# Altium integrated library 62684-5511N0AHLF.IntLib: 1 symbol
Pins are listed as number, name and electrical type; pins without a type are passive.

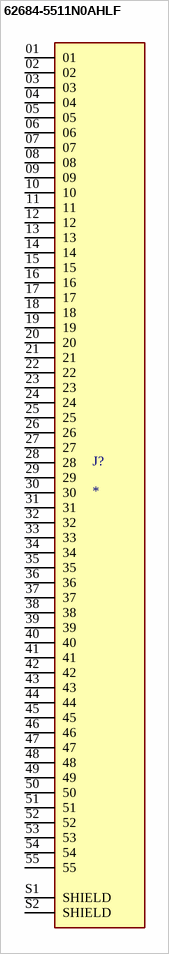
[diagram p0: symbol 62684-5511N0AHLF]

## 62684-5511N0AHLF
designator J?
55 Position FPC Connector Contacts, Bottom 0.020 (0.50mm) Surface Mount, Right Angle; MF: Amphenol; MP: 626845511N0AHLF; SnapEDA_Link: https://www.snapeda.com/parts/626845511N0AHLF/Amphenol/view-part/?ref=snap; Package: None; Value: *; Check_prices: https://www.snapeda.com/parts/626845511N0AHLF/Amphenol/view-part/?ref=eda
footprint AMPHENOL_62684-5511N0AHLF
pins: 01, 02, 03, 04, 05, 06, 07, 08, 09, 10, 11, 12, 13, 14, 15, 16, 17, 18, 19, 20, 21, 22, 23, 24, 25, 26, 27, 28, 29, 30, 31, 32, 33, 34, 35, 36, 37, 38, 39, 40, 41, 42, 43, 44, 45, 46, 47, 48, 49, 50, 51, 52, 53, 54, 55, S1 SHIELD, S2 SHIELD